# Altium schematic symbol library TSV911AILT.SchLib: 1 symbol
Pins are listed as number, name and electrical type; pins without a type are passive.

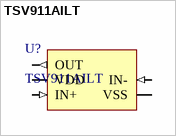
[diagram p0: symbol TSV911AILT]

## TSV911AILT
designator U?
IC: operational amplifier; 8MHz; Ch: 1; 2.5÷5.5VDC; SOT23-5; 3mV
footprint TSV911AILT (IC: operational amplifier; 8MHz; Ch: 1; 2.5÷5.5VDC; SOT23-5; 3mV)
pins: 1 OUT (out), 2 VDD (power), 3 IN+ (in), 4 VSS (power), 5 IN- (in)